# Altium footprint library Ib_.PcbLib: 55 footprints (part 1 of 4)
Each footprint in its own frame and in the unit in brackets; x right, y up, seen from the top. Pads: shape width x height; smd on the part's side, far side on the other; paste and mask are expansions set on the pad; w line width, h text height; cw(c..) or ccw(c..) is an arc to the next point about the centre after c.
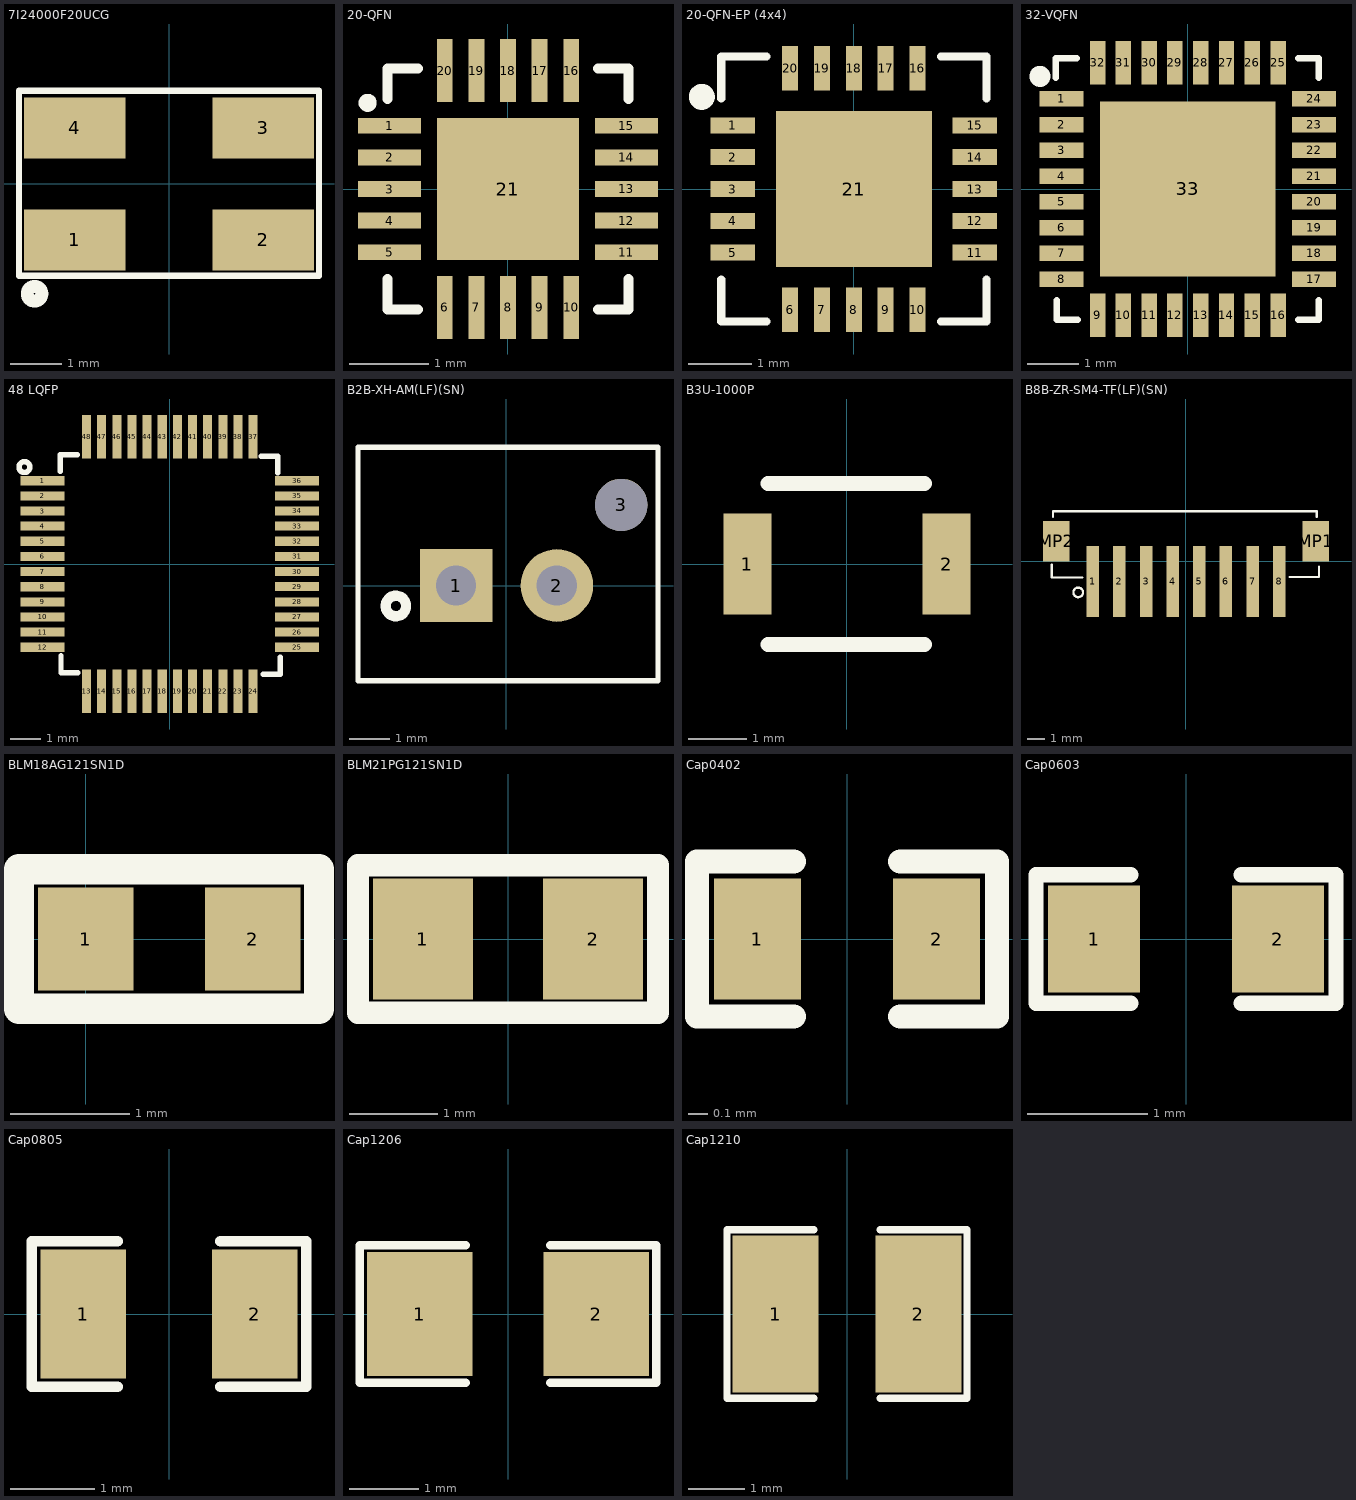
[diagram p0: the footprints below, top view; thin cyan lines are the x and y axes]

## 7I24000F20UCG [mm] "24MHz ±20ppm 20pF 40O SMD-5032_4P Crystals RoHS"
pads (4):
  rect 2x1.2 smd: 1(-1.85,-1.1) 2(1.85,-1.1) 3(1.85,1.1) 4(-1.85,1.1)
Top Overlay:
  circle w0.254: c-2.642,-2.159 r0.144
  lines w0.127: -2.946,-1.803 2.946,-1.803 2.946,1.829 -2.946,1.829 -2.946,-1.803
3D body "User Library-CRYSTALSMD5X32.STEP": height 1, standoff 0, extent -2.475,-1.6 2.525,1.6

## 20-QFN [mm] "IC MCU 8BIT 16KB FLASH 20VQFN"
pads (21):
  rect 0.8x0.2 smd: 1(-1.5,0.8) 2(-1.5,0.4) 3(-1.5,0) 4(-1.5,-0.4) 5(-1.5,-0.8) 11(1.5,-0.8) 12(1.5,-0.4) 13(1.5,0) 14(1.5,0.4) 15(1.5,0.8)
  rect 0.2x0.8 smd: 6(-0.8,-1.5) 7(-0.4,-1.5) 8(0,-1.5) 9(0.4,-1.5) 10(0.8,-1.5) 16(0.8,1.5) 17(0.4,1.5) 18(0,1.5) 19(-0.4,1.5) 20(-0.8,1.5)
  rect 1.8x1.8 smd: 21(0,0)
Top Overlay:
  circle w0.127: c-1.778,1.092 r0.051
  lines w0.127: -1.524,-1.143 -1.524,-1.524 -1.143,-1.524 ; -1.524,1.143 -1.524,1.524 -1.143,1.524 ; 1.143,-1.524 1.524,-1.524 1.524,-1.143 ; 1.143,1.524 1.524,1.524 1.524,1.143
3D body "VQFN20_3X3_MCH.step": height 0.59, standoff 0, extent -1.499,-1.499 1.499,1.499

## 20-QFN-EP (4x4) [mm]
pads (21):
  rect 0.7x0.25 smd: 1(-1.9,1) 2(-1.9,0.5) 3(-1.9,0) 4(-1.9,-0.5) 5(-1.9,-1) 11(1.9,-1) 12(1.9,-0.5) 13(1.9,0) 14(1.9,0.5) 15(1.9,1)
  rect 0.25x0.7 smd: 6(-1,-1.9) 7(-0.5,-1.9) 8(0,-1.9) 9(0.5,-1.9) 10(1,-1.9) 16(1,1.9) 17(0.5,1.9) 18(0,1.9) 19(-0.5,1.9) 20(-1,1.9)
  rect 2.45x2.45 smd: 21(0,0)
Top Overlay:
  circle w0.254: c-2.388,1.448 r0.076
  lines w0.127: -2.083,-1.422 -2.083,-2.083 -1.372,-2.083 ; -2.083,1.422 -2.083,2.083 -1.372,2.083 ; 1.372,-2.083 2.083,-2.083 2.083,-1.422 ; 1.372,2.083 2.083,2.083 2.083,1.422
3D body "20M1.step": height 0.94, standoff 0, extent -2.032,-2.032 2.032,2.032

## 32-VQFN [mm] "IC MCU 8BIT 32KB FLASH 32VFQFN"
pads (33):
  rect 0.85x0.3 smd: 1(-2.45,1.75) 2(-2.45,1.25) 3(-2.45,0.75) 4(-2.45,0.25) 5(-2.45,-0.25) 6(-2.45,-0.75) 7(-2.45,-1.25) 8(-2.45,-1.75) 17(2.45,-1.75) 18(2.45,-1.25) 19(2.45,-0.75) 20(2.45,-0.25) 21(2.45,0.25) 22(2.45,0.75) 23(2.45,1.25) 24(2.45,1.75)
  rect 0.3x0.85 smd: 9(-1.75,-2.45) 10(-1.25,-2.45) 11(-0.75,-2.45) 12(-0.25,-2.45) 13(0.25,-2.45) 14(0.75,-2.45) 15(1.25,-2.45) 16(1.75,-2.45) 25(1.75,2.45) 26(1.25,2.45) 27(0.75,2.45) 28(0.25,2.45) 29(-0.25,2.45) 30(-0.75,2.45) 31(-1.25,2.45) 32(-1.75,2.45)
  rect 3.4x3.4 smd: 33(0,0)
Top Overlay:
  circle w0.254: c-2.87,2.184 r0.076
  lines w0.127: -2.561,2.159 -2.561,2.54 -2.159,2.54 ; -2.54,-2.159 -2.54,-2.54 -2.138,-2.54 ; 2.138,-2.54 2.54,-2.54 2.54,-2.159 ; 2.138,2.54 2.54,2.54 2.54,2.159
3D body "32M1-A_MCH.step": height 1.4, standoff 0, extent -2.55,-2.55 2.55,2.55

## 48 LQFP [mm] "7mm x 7mm x 1.4mm, 0.5mm pitch"
pads (48):
  rect 1.45x0.3 smd: 1(-4.202,2.75) 2(-4.202,2.25) 3(-4.202,1.75) 4(-4.202,1.25) 5(-4.202,0.75) 6(-4.202,0.25) 7(-4.202,-0.25) 8(-4.202,-0.75) 9(-4.202,-1.25) 10(-4.202,-1.75) 11(-4.202,-2.25) 12(-4.202,-2.75) 25(4.202,-2.749) 26(4.202,-2.25) 27(4.202,-1.75) 28(4.202,-1.25) 29(4.202,-0.75) 30(4.202,-0.25) 31(4.202,0.25) 32(4.202,0.75) 33(4.202,1.25) 34(4.202,1.75) 35(4.202,2.25) 36(4.202,2.75)
  rect 0.3x1.45 smd: 13(-2.75,-4.202) 14(-2.25,-4.202) 15(-1.75,-4.202) 16(-1.25,-4.202) 17(-0.75,-4.202) 18(-0.25,-4.202) 19(0.25,-4.202) 20(0.75,-4.202) 21(1.25,-4.202) 22(1.75,-4.202) 23(2.25,-4.202) 24(2.75,-4.202) 37(2.75,4.202) 38(2.25,4.202) 39(1.75,4.202) 40(1.25,4.202) 41(0.75,4.202) 42(0.25,4.202) 43(-0.25,4.202) 44(-0.75,4.202) 45(-1.25,4.202) 46(-1.75,4.202) 47(-2.25,4.202) 48(-2.75,4.202)
Top Overlay:
  lines w0.178: -4.626,3.243 ccw(c-4.801,3.2) -4.621,3.193 ; -3.618,3.055 -3.618,3.614 -3.059,3.614 ; -3.592,-3.023 -3.592,-3.587 -3.034,-3.587 ; 3.012,3.563 3.57,3.563 3.57,3.004 ; 3.088,-3.638 3.647,-3.638 3.647,-3.079
3D body "SW3dPS-LQFP48.STEP": height 1.5, standoff 0, extent -4.5,-4.5 4.5,4.5

## B2B-XH-AM(LF)(SN) [mm] "XH Header Male Pin 0.098\"(2.50mm) 2 Through Hole,P=2.5mm Wire To Board / Wire To Wire Connector RoHS"
pads (3):
  rect 1.8x1.8 hole 1: 1(-1.25,0)
  round 1.8 hole 1: 2(1.25,0)
  round 1.295 hole 1.295 unplated: 3(2.85,2)
Top Overlay:
  circle w0.254: c-2.743,-0.508 r0.254
  lines w0.127: -3.683,-2.362 3.759,-2.362 3.759,3.429 -3.683,3.429 -3.683,-2.362
3D body "B2B-XH-AM.STEP": height 7, standoff -3.4, extent -3.649,-2.367 3.751,3.383

## B3U-1000P [mm] "SWITCH TACTILE SPST-NO 0.05A 12V"
pads (2):
  rect 0.82x1.72 smd: 1(-1.7,0) 2(1.7,0)
Top Overlay:
  lines w0.254: -1.346,-1.372 0,-1.372 1.321,-1.372 ; -1.346,1.372 0,1.372 1.321,1.372
3D body "User Library-OMRON B3U1000P.step": height 1.6, standoff 0, extent -2,-1.263 2,1.237

## B8B-ZR-SM4-TF(LF)(SN) [mm] "ZH Header Male Pin 0.059\"(1.50mm) 8 SMD,P=1.5mm Wire To Board / Wire To Wire Connector RoHS"
pads (10):
  rect 0.7x4 smd: 1(-5.25,-1.125) 2(-3.75,-1.125) 3(-2.25,-1.125) 4(-0.75,-1.125) 5(0.75,-1.125) 6(2.25,-1.125) 7(3.75,-1.125) 8(5.25,-1.125)
  rect 1.5x2.3 smd: MP1(7.3,1.125) MP2(-7.3,1.125)
Top Overlay:
  circle w0.127: c-6.071,-1.753 r0.27
  lines w0.127: -7.569,-0.178 -7.569,-0.914 -5.842,-0.914 ; -7.493,2.515 -7.493,2.819 7.366,2.819 7.366,2.515 ; 5.842,-0.889 7.493,-0.889 7.493,-0.289
3D body "B8B-ZR-SM4-TF.STEP": height 5, standoff 0, extent -7.525,-2.406 7.475,2.794

## BLM18AG121SN1D [mm] "120O @ 100MHz 500mA 1 180mO 0603 Ferrite Beads RoHS"
pads (2):
  rect 0.8x0.864 smd: 1(0,0) 2(1.4,0)
Top Overlay:
  lines w0.254: -0.559,-0.584 -0.559,0.584 1.956,0.584 1.956,-0.584 -0.559,-0.584
3D body "BLM18AG121SN1D.STEP": height 0.95, standoff 0, extent -0.063,-0.4 1.537,0.4

## BLM21PG121SN1D [mm] "120O @ 100MHz 3A 1 30mO 0805 Ferrite Beads RoHS"
pads (2):
  rect 1.133x1.377 smd: 1(-0.966,0) 2(0.966,0)
Top Overlay:
  lines w0.254: -1.702,-0.838 -1.702,0.838 1.702,0.838 1.702,-0.838 -1.702,-0.838
3D body "BLM21PG121SN1D.STEP": height 1.05, standoff 0, extent -1,-0.625 1,0.625

## C146124 [mm] "XH Header Male Pin 0.100\"(2.54mm) 8 SMD,P=2.54mm Wire To Board / Wire To Wire Connector RoHS"

## Cap0402 [mil]
pads (2):
  rect 18x25 smd mask+2.36: 1(-18.5,0) 2(18.5,0)
Top Overlay:
  lines w5: -11,-16 -31,-16 -31,16 -11,16 ; 11,-16 31,-16 31,16 11,16
3D body "User Library-Capacitor 0402.step": height 18.5, standoff -1.18, extent -19.68,-9.84 19.7,9.85

## Cap0603 [mil]
pads (2):
  rect 30x35 smd mask+2.36: 1(-30,0) 2(30,0)
Top Overlay:
  lines w5: -18,-21 -49,-21 -49,21 -18,21 ; 18,-21 49,-21 49,21 18,21
3D body "User Library-CAPC1608X09.step": height 34.25, standoff -1.18, extent -31.51,-15.75 31.49,15.74

## Cap0805 [mil] "SMD 0805"
pads (2):
  rect 40x60 smd mask+2.76: 1(-40,0) 2(40,0)
Top Overlay:
  lines w5: -24,-34 -64,-34 -64,34 -24,34 ; 24,-34 64,-34 64,34 24,34
3D body "User Library-0805 SMD Capacitor.step": height 30, standoff -0.79, extent -39.36,-24.6 39.38,24.61

## Cap1206 [mil] "SMD 1206"
pads (2):
  rect 60x70 smd: 1(-50,0) 2(50,0)
Top Overlay:
  lines w5: -24,-39 -84,-39 -84,39 -24,39 ; 24,-39 84,-39 84,39 24,39
3D body "User Library-1206 SMD Capacitor.step": height 39.45, standoff 0, extent -62.96,-31.46 63.03,31.53

## Cap1210 [mil] "SMD 1210"
pads (2):
  rect 60x110 smd: 1(-50,0) 2(50,0)
Top Overlay:
  lines w5: -23,-59 -84,-59 -84,59 -23,59 ; 23,-59 84,-59 84,59 23,59
3D body "User Library-CAPC3225X10.step": height 39.37, standoff 0, extent -62.99,-49.21 63,49.22